# Altium schematic symbol library 3_3nF.SchLib: 1 symbol
Pins are listed as number, name and electrical type; pins without a type are passive.

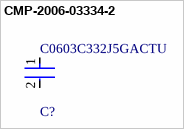
[diagram p0: symbol CMP-2006-03334-2]

## CMP-2006-03334-2
designator C?, comment C0603C332J5GACTU
CAP CER 3300PF 50V 5% NP0 0603; Manufacturer: KEMET; Value: 3,300 pF; Temperature Characteristic: C0G; Temperature Coefficient: 30ppm/°C; Tolerance: 0.05; Automotive Grade: Grade 1; Material: Ceramic; Category: Cap; Digikey Description: CAP CER 3300PF 50V 5% NP0 0603; Temperature Range Low: -55°C; Mouser Description: Multilayer Ceramic Capacitors MLCC - SMD/SMT 50volts 3300pF 5% C0G; Device Class L2: Capacitors; Octopart: https://octopart.com/c0603c332j5gactu-kemet-12580539; Package: C0603C-CF; Lead Free: Yes; Temperature Range High: +125°C; Automotive: Yes; ComponentLink2URL: https://api.kemet.com/component-edge/download/datasheet/C0603C100J5GACAUTO.pdf; Voltage Rating: 50 V; Device Class L3: Ceramic Capacitors; Temperature: -55°C to +125°C; ComponentLink2Description: Datasheet; Device Class L1: Passive Components; Manufacturer Part Number: C0603C332J5GACTU; Capacitance: 3,300 pF; Height: 0.87mm; RoHS: TRUE
footprint FP-C0603C-CF-IPC_B
footprint FP-C0603C-CF-MFG
footprint FP-C0603C-CF-IPC_A
footprint FP-C0603C-CF-IPC_C
pins: 1, 2